# Altium schematic symbol library KCD11-101N.SchLib: 1 symbol
Pins are listed as number, name and electrical type; pins without a type are passive.

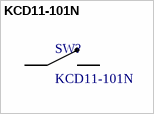
[diagram p0: symbol KCD11-101N]

## KCD11-101N
designator SW?
Rocker Switch SPST; Manufacturer Name: Non-Brand; Manufacturer Part Number: KCD1-2-(3A 250V AC)
footprint KCD11-101N (Rocket Switch SPST)
pins: 1 CM, 2 NO